# Altium footprint library Connector-KF2EDGK.PcbLib: 91 footprints (part 5 of 6)
Each footprint in its own frame and in the unit in brackets; x right, y up, seen from the top. Pads: shape width x height; smd on the part's side, far side on the other; paste and mask are expansions set on the pad; w line width, h text height; cw(c..) or ccw(c..) is an arc to the next point about the centre after c.
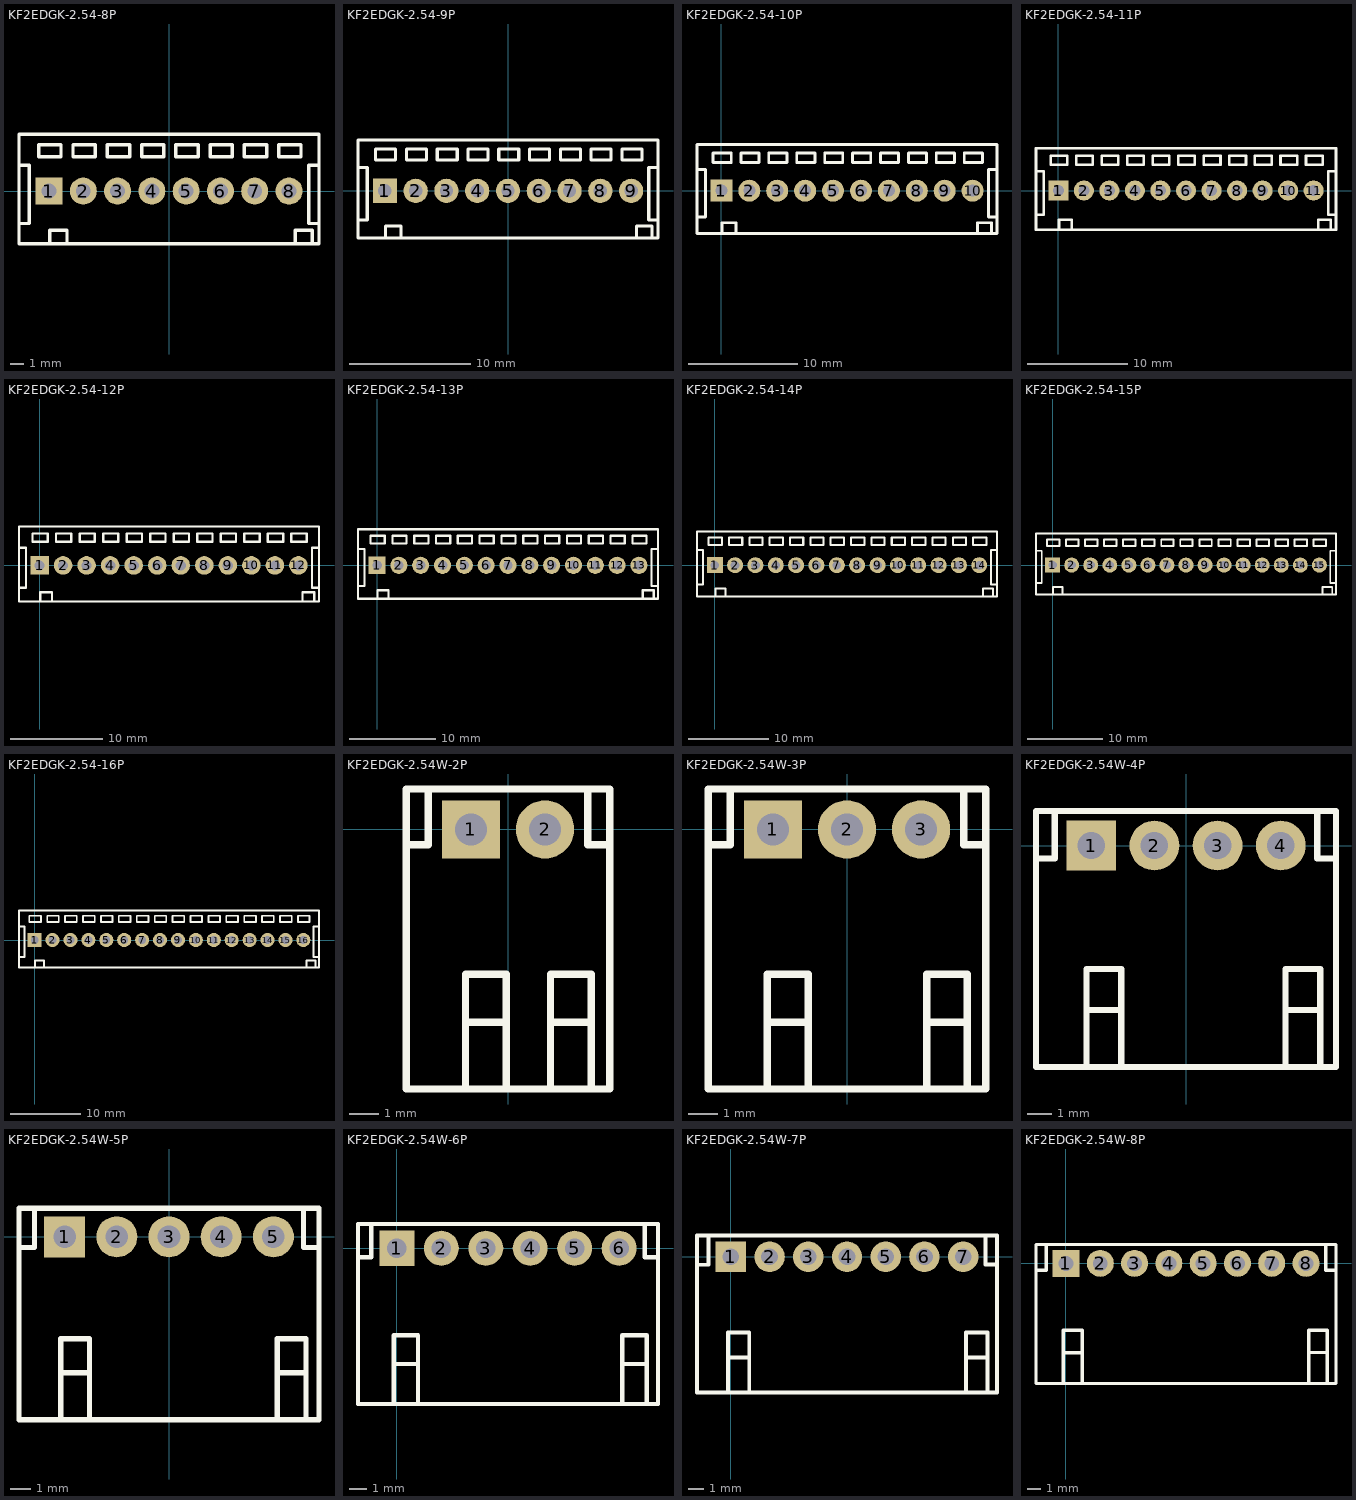
[diagram p4: the footprints below, top view; thin cyan lines are the x and y axes]

## KF2EDGK-2.54-8P [mm]
pads (8):
  rect 2x2 hole 1.1: 1(-8.89,0)
  round 2 hole 1.1: 2(-6.35,0) 3(-3.81,0) 4(-1.27,0) 5(1.27,0) 6(3.81,0) 7(6.35,0) 8(8.89,0)
Top Overlay:
  lines w0.254: -8.824,-3.839 -8.824,-2.912 -7.554,-2.912 -7.554,-3.839 ; 9.337,-3.839 9.337,-2.912 10.607,-2.912 10.607,-3.839 ; 11.11,-2.404 10.348,-2.404 10.348,1.914 11.11,1.914 ; -11.11,-2.404 -11.11,-3.9 11.11,-3.9 11.11,1.914 ; -11.11,-2.404 -10.348,-2.404 -10.348,1.914 -11.11,1.914 ; -11.11,-2.404 -11.11,1.914 ; -11.11,1.914 -11.11,4.2 11.11,4.2 11.11,1.914 ; -9.652,2.549 -9.652,3.438 -8.001,3.438 -8.001,2.549 -9.652,2.549 ; -7.112,2.549 -7.112,3.438 -5.461,3.438 -5.461,2.549 -7.112,2.549 ; -4.572,2.549 -4.572,3.438 -2.921,3.438 -2.921,2.549 -4.572,2.549 ; -2.032,2.549 -2.032,3.438 -0.381,3.438 -0.381,2.549 -2.032,2.549 ; 0.508,2.549 2.159,2.549 2.159,3.438 0.508,3.438 0.508,2.549 ; 3.048,2.549 3.048,3.438 4.699,3.438 4.699,2.549 3.048,2.549 ; 5.588,2.549 5.588,3.438 7.239,3.438 7.239,2.549 5.588,2.549 ; 8.128,2.549 8.128,3.438 9.779,3.438 9.779,2.549 8.128,2.549
3D body "KF2EDGK-2.54-8P.STEP": height 10.15, standoff -3.15, extent -11.12,-3.898 11.1,4.202

## KF2EDGK-2.54-9P [mm]
pads (9):
  rect 2x2 hole 1.1: 1(-10.16,0)
  round 2 hole 1.1: 2(-7.62,0) 3(-5.08,0) 4(-2.54,0) 5(0,0) 6(2.54,0) 7(5.08,0) 8(7.62,0) 9(10.16,0)
Top Overlay:
  lines w0.254: -10.094,-3.839 -10.094,-2.912 -8.824,-2.912 -8.824,-3.839 ; 10.607,-3.839 10.607,-2.912 11.877,-2.912 11.877,-3.839 ; 12.38,-2.404 11.618,-2.404 11.618,1.914 12.38,1.914 ; -12.38,-2.404 -12.38,1.914 ; -12.38,-2.404 -11.618,-2.404 -11.618,1.914 -12.38,1.914 ; -12.38,-2.404 -12.38,-3.9 12.38,-3.9 12.38,1.914 ; -12.38,1.914 -12.38,4.2 12.38,4.2 12.38,1.914 ; -10.922,2.549 -9.271,2.549 -9.271,3.438 -10.922,3.438 -10.922,2.549 ; -8.382,2.549 -6.731,2.549 -6.731,3.438 -8.382,3.438 -8.382,2.549 ; -5.842,2.549 -4.191,2.549 -4.191,3.438 -5.842,3.438 -5.842,2.549 ; -3.302,2.549 -1.651,2.549 -1.651,3.438 -3.302,3.438 -3.302,2.549 ; -0.762,2.549 -0.762,3.438 0.889,3.438 0.889,2.549 -0.762,2.549 ; 1.778,2.549 1.778,3.438 3.429,3.438 3.429,2.549 1.778,2.549 ; 4.318,2.549 4.318,3.438 5.969,3.438 5.969,2.549 4.318,2.549 ; 6.858,2.549 6.858,3.438 8.509,3.438 8.509,2.549 6.858,2.549 ; 9.398,2.549 9.398,3.438 11.049,3.438 11.049,2.549 9.398,2.549
3D body "KF2EDGK-2.54-9P.STEP": height 10.15, standoff -3.15, extent -12.39,-3.898 12.37,4.202

## KF2EDGK-2.54-10P [mm]
pads (10):
  rect 2x2 hole 1.1: 1(0,0)
  round 2 hole 1.1: 2(2.54,0) 3(5.08,0) 4(7.62,0) 5(10.16,0) 6(12.7,0) 7(15.24,0) 8(17.78,0) 9(20.32,0) 10(22.86,0)
Top Overlay:
  lines w0.254: 0.066,-3.839 0.066,-2.912 1.336,-2.912 1.336,-3.839 ; 23.307,-3.839 23.307,-2.912 24.577,-2.912 24.577,-3.839 ; 25.08,-2.404 24.318,-2.404 24.318,1.914 25.08,1.914 ; -2.22,-2.404 -2.22,1.914 ; -2.22,-2.404 -1.458,-2.404 -1.458,1.914 -2.22,1.914 ; -2.22,-2.404 -2.22,-3.9 25.08,-3.9 25.08,1.914 ; -2.22,1.914 -2.22,4.2 25.08,4.2 25.08,1.914 ; -0.762,2.549 0.889,2.549 0.889,3.438 -0.762,3.438 -0.762,2.549 ; 1.778,2.549 3.429,2.549 3.429,3.438 1.778,3.438 1.778,2.549 ; 4.318,2.549 5.969,2.549 5.969,3.438 4.318,3.438 4.318,2.549 ; 6.858,2.549 8.509,2.549 8.509,3.438 6.858,3.438 6.858,2.549 ; 9.398,2.549 9.398,3.438 11.049,3.438 11.049,2.549 9.398,2.549 ; 11.938,2.549 13.589,2.549 13.589,3.438 11.938,3.438 11.938,2.549 ; 14.478,2.549 16.129,2.549 16.129,3.438 14.478,3.438 14.478,2.549 ; 17.018,2.549 18.669,2.549 18.669,3.438 17.018,3.438 17.018,2.549 ; 19.558,2.549 21.209,2.549 21.209,3.438 19.558,3.438 19.558,2.549 ; 22.098,2.549 22.098,3.438 23.749,3.438 23.749,2.549 22.098,2.549
3D body "KF2EDGK-2.54-10P.STEP": height 10.15, standoff -3.15, extent -2.23,-3.923 25.07,4.177

## KF2EDGK-2.54-11P [mm]
pads (11):
  rect 2x2 hole 1.1: 1(0,0)
  round 2 hole 1.1: 2(2.54,0) 3(5.08,0) 4(7.62,0) 5(10.16,0) 6(12.7,0) 7(15.24,0) 8(17.78,0) 9(20.32,0) 10(22.86,0) 11(25.4,0)
Top Overlay:
  lines w0.254: 0.066,-3.839 0.066,-2.912 1.336,-2.912 1.336,-3.839 ; 25.847,-3.839 25.847,-2.912 27.117,-2.912 27.117,-3.839 ; 27.62,-2.404 26.858,-2.404 26.858,1.914 27.62,1.914 ; -2.22,-2.404 -2.22,1.914 ; -2.22,-2.404 -1.458,-2.404 -1.458,1.914 -2.22,1.914 ; -2.22,-2.404 -2.22,-3.9 27.62,-3.9 27.62,1.914 ; -2.22,1.914 -2.22,4.2 27.62,4.2 27.62,1.914 ; -0.762,2.549 -0.762,3.438 0.889,3.438 0.889,2.549 -0.762,2.549 ; 1.778,2.549 1.778,3.438 3.429,3.438 3.429,2.549 1.778,2.549 ; 4.318,2.549 4.318,3.438 5.969,3.438 5.969,2.549 4.318,2.549 ; 6.858,2.549 6.858,3.438 8.509,3.438 8.509,2.549 6.858,2.549 ; 9.398,2.549 11.049,2.549 11.049,3.438 9.398,3.438 9.398,2.549 ; 11.938,2.549 11.938,3.438 13.589,3.438 13.589,2.549 11.938,2.549 ; 14.478,2.549 14.478,3.438 16.129,3.438 16.129,2.549 14.478,2.549 ; 17.018,2.549 17.018,3.438 18.669,3.438 18.669,2.549 17.018,2.549 ; 19.558,2.549 19.558,3.438 21.209,3.438 21.209,2.549 19.558,2.549 ; 22.098,2.549 23.749,2.549 23.749,3.438 22.098,3.438 22.098,2.549 ; 24.638,2.549 26.289,2.549 26.289,3.438 24.638,3.438 24.638,2.549
3D body "KF2EDGK-2.54-11P.STEP": height 10.15, standoff -3.15, extent -2.205,-3.923 27.635,4.177

## KF2EDGK-2.54-12P [mm]
pads (12):
  rect 2x2 hole 1.1: 1(0,0)
  round 2 hole 1.1: 2(2.54,0) 3(5.08,0) 4(7.62,0) 5(10.16,0) 6(12.7,0) 7(15.24,0) 8(17.78,0) 9(20.32,0) 10(22.86,0) 11(25.4,0) 12(27.94,0)
Top Overlay:
  lines w0.254: 0.066,-3.839 0.066,-2.912 1.336,-2.912 1.336,-3.839 ; 28.387,-3.839 28.387,-2.912 29.657,-2.912 29.657,-3.839 ; 30.16,-2.404 29.398,-2.404 29.398,1.914 30.16,1.914 ; -2.22,-2.404 -2.22,1.914 ; -2.22,-2.404 -1.458,-2.404 -1.458,1.914 -2.22,1.914 ; -2.22,-2.404 -2.22,-3.9 30.16,-3.9 30.16,1.914 ; -2.22,1.914 -2.22,4.2 30.16,4.2 30.16,1.914 ; -0.762,2.549 0.889,2.549 0.889,3.438 -0.762,3.438 -0.762,2.549 ; 1.778,2.549 3.429,2.549 3.429,3.438 1.778,3.438 1.778,2.549 ; 4.318,2.549 5.969,2.549 5.969,3.438 4.318,3.438 4.318,2.549 ; 6.858,2.549 8.509,2.549 8.509,3.438 6.858,3.438 6.858,2.549 ; 9.398,2.549 9.398,3.438 11.049,3.438 11.049,2.549 9.398,2.549 ; 11.938,2.549 13.589,2.549 13.589,3.438 11.938,3.438 11.938,2.549 ; 14.478,2.549 16.129,2.549 16.129,3.438 14.478,3.438 14.478,2.549 ; 17.018,2.549 18.669,2.549 18.669,3.438 17.018,3.438 17.018,2.549 ; 19.558,2.549 21.209,2.549 21.209,3.438 19.558,3.438 19.558,2.549 ; 22.098,2.549 22.098,3.438 23.749,3.438 23.749,2.549 22.098,2.549 ; 24.638,2.549 24.638,3.438 26.289,3.438 26.289,2.549 24.638,2.549 ; 27.178,2.549 27.178,3.438 28.829,3.438 28.829,2.549 27.178,2.549
3D body "KF2EDGK-2.54-12P.STEP": height 10.15, standoff -3.15, extent -2.179,-3.912 30.201,4.188

## KF2EDGK-2.54-13P [mm]
pads (13):
  rect 2x2 hole 1.1: 1(0,0)
  round 2 hole 1.1: 2(2.54,0) 3(5.08,0) 4(7.62,0) 5(10.16,0) 6(12.7,0) 7(15.24,0) 8(17.78,0) 9(20.32,0) 10(22.86,0) 11(25.4,0) 12(27.94,0) 13(30.48,0)
Top Overlay:
  lines w0.254: 0.066,-3.839 0.066,-2.912 1.336,-2.912 1.336,-3.839 ; 30.927,-3.839 30.927,-2.912 32.197,-2.912 32.197,-3.839 ; 32.7,-2.404 31.938,-2.404 31.938,1.914 32.7,1.914 ; -2.22,-2.404 -2.22,1.914 ; -2.22,-2.404 -1.458,-2.404 -1.458,1.914 -2.22,1.914 ; -2.22,-2.404 -2.22,-3.9 32.7,-3.9 32.7,1.914 ; -2.22,1.914 -2.22,4.2 32.7,4.2 32.7,1.914 ; -0.762,2.549 0.889,2.549 0.889,3.438 -0.762,3.438 -0.762,2.549 ; 1.778,2.549 3.429,2.549 3.429,3.438 1.778,3.438 1.778,2.549 ; 4.318,2.549 5.969,2.549 5.969,3.438 4.318,3.438 4.318,2.549 ; 6.858,2.549 8.509,2.549 8.509,3.438 6.858,3.438 6.858,2.549 ; 9.398,2.549 9.398,3.438 11.049,3.438 11.049,2.549 9.398,2.549 ; 11.938,2.549 13.589,2.549 13.589,3.438 11.938,3.438 11.938,2.549 ; 14.478,2.549 16.129,2.549 16.129,3.438 14.478,3.438 14.478,2.549 ; 17.018,2.549 18.669,2.549 18.669,3.438 17.018,3.438 17.018,2.549 ; 19.558,2.549 21.209,2.549 21.209,3.438 19.558,3.438 19.558,2.549 ; 22.098,2.549 22.098,3.438 23.749,3.438 23.749,2.549 22.098,2.549 ; 24.638,2.549 24.638,3.438 26.289,3.438 26.289,2.549 24.638,2.549 ; 27.178,2.549 27.178,3.438 28.829,3.438 28.829,2.549 27.178,2.549 ; 29.718,2.549 29.718,3.438 31.369,3.438 31.369,2.549 29.718,2.549
3D body "KF2EDGK-2.54-13P.STEP": height 10.15, standoff -3.15, extent -2.23,-3.898 32.69,4.202

## KF2EDGK-2.54-14P [mm]
pads (14):
  rect 2x2 hole 1.1: 1(0,0)
  round 2 hole 1.1: 2(2.54,0) 3(5.08,0) 4(7.62,0) 5(10.16,0) 6(12.7,0) 7(15.24,0) 8(17.78,0) 9(20.32,0) 10(22.86,0) 11(25.4,0) 12(27.94,0) 13(30.48,0) 14(33.02,0)
Top Overlay:
  lines w0.254: 0.066,-3.839 0.066,-2.912 1.336,-2.912 1.336,-3.839 ; 33.467,-3.839 33.467,-2.912 34.737,-2.912 34.737,-3.839 ; 35.24,-2.404 34.478,-2.404 34.478,1.914 35.24,1.914 ; -2.22,-2.404 -2.22,1.914 ; -2.22,-2.404 -1.458,-2.404 -1.458,1.914 -2.22,1.914 ; -2.22,-2.404 -2.22,-3.9 35.24,-3.9 35.24,1.914 ; -2.22,1.914 -2.22,4.2 35.24,4.2 35.24,1.914 ; -0.762,2.549 0.889,2.549 0.889,3.438 -0.762,3.438 -0.762,2.549 ; 1.778,2.549 3.429,2.549 3.429,3.438 1.778,3.438 1.778,2.549 ; 4.318,2.549 5.969,2.549 5.969,3.438 4.318,3.438 4.318,2.549 ; 6.858,2.549 8.509,2.549 8.509,3.438 6.858,3.438 6.858,2.549 ; 9.398,2.549 9.398,3.438 11.049,3.438 11.049,2.549 9.398,2.549 ; 11.938,2.549 13.589,2.549 13.589,3.438 11.938,3.438 11.938,2.549 ; 14.478,2.549 16.129,2.549 16.129,3.438 14.478,3.438 14.478,2.549 ; 17.018,2.549 18.669,2.549 18.669,3.438 17.018,3.438 17.018,2.549 ; 19.558,2.549 21.209,2.549 21.209,3.438 19.558,3.438 19.558,2.549 ; 22.098,2.549 22.098,3.438 23.749,3.438 23.749,2.549 22.098,2.549 ; 24.638,2.549 24.638,3.438 26.289,3.438 26.289,2.549 24.638,2.549 ; 27.178,2.549 27.178,3.438 28.829,3.438 28.829,2.549 27.178,2.549 ; 29.718,2.549 29.718,3.438 31.369,3.438 31.369,2.549 29.718,2.549 ; 32.258,2.549 32.258,3.438 33.909,3.438 33.909,2.549 32.258,2.549
3D body "KF2EDGK-2.54-14P.STEP": height 10.15, standoff -3.15, extent -2.23,-3.948 35.23,4.152

## KF2EDGK-2.54-15P [mm]
pads (15):
  rect 2x2 hole 1.1: 1(0,0)
  round 2 hole 1.1: 2(2.54,0) 3(5.08,0) 4(7.62,0) 5(10.16,0) 6(12.7,0) 7(15.24,0) 8(17.78,0) 9(20.32,0) 10(22.86,0) 11(25.4,0) 12(27.94,0) 13(30.48,0) 14(33.02,0) 15(35.56,0)
Top Overlay:
  lines w0.254: 0.066,-3.839 0.066,-2.912 1.336,-2.912 1.336,-3.839 ; 36.007,-3.839 36.007,-2.912 37.277,-2.912 37.277,-3.839 ; 37.78,-2.404 37.018,-2.404 37.018,1.914 37.78,1.914 ; -2.22,-2.404 -2.22,-3.9 37.78,-3.9 37.78,1.914 ; -2.22,-2.404 -1.458,-2.404 -1.458,1.914 -2.22,1.914 ; -2.22,-2.404 -2.22,1.914 ; -2.22,1.914 -2.22,4.2 37.78,4.2 37.78,1.914 ; -0.762,2.549 0.889,2.549 0.889,3.438 -0.762,3.438 -0.762,2.549 ; 1.778,2.549 3.429,2.549 3.429,3.438 1.778,3.438 1.778,2.549 ; 4.318,2.549 5.969,2.549 5.969,3.438 4.318,3.438 4.318,2.549 ; 6.858,2.549 8.509,2.549 8.509,3.438 6.858,3.438 6.858,2.549 ; 9.398,2.549 9.398,3.438 11.049,3.438 11.049,2.549 9.398,2.549 ; 11.938,2.549 13.589,2.549 13.589,3.438 11.938,3.438 11.938,2.549 ; 14.478,2.549 16.129,2.549 16.129,3.438 14.478,3.438 14.478,2.549 ; 17.018,2.549 18.669,2.549 18.669,3.438 17.018,3.438 17.018,2.549 ; 19.558,2.549 21.209,2.549 21.209,3.438 19.558,3.438 19.558,2.549 ; 22.098,2.549 22.098,3.438 23.749,3.438 23.749,2.549 22.098,2.549 ; 24.638,2.549 26.289,2.549 26.289,3.438 24.638,3.438 24.638,2.549 ; 27.178,2.549 28.829,2.549 28.829,3.438 27.178,3.438 27.178,2.549 ; 29.718,2.549 31.369,2.549 31.369,3.438 29.718,3.438 29.718,2.549 ; 32.258,2.549 33.909,2.549 33.909,3.438 32.258,3.438 32.258,2.549 ; 34.798,2.549 34.798,3.438 36.449,3.438 36.449,2.549 34.798,2.549
3D body "KF2EDGK-2.54-15P.STEP": height 10.15, standoff -3.15, extent -2.184,-3.923 37.816,4.177

## KF2EDGK-2.54-16P [mm]
pads (16):
  rect 2x2 hole 1.1: 1(0,0)
  round 2 hole 1.1: 2(2.54,0) 3(5.08,0) 4(7.62,0) 5(10.16,0) 6(12.7,0) 7(15.24,0) 8(17.78,0) 9(20.32,0) 10(22.86,0) 11(25.4,0) 12(27.94,0) 13(30.48,0) 14(33.02,0) 15(35.56,0) 16(38.1,0)
Top Overlay:
  lines w0.254: 0.066,-3.839 0.066,-2.912 1.336,-2.912 1.336,-3.839 ; 38.547,-3.839 38.547,-2.912 39.817,-2.912 39.817,-3.839 ; 40.32,-2.404 39.558,-2.404 39.558,1.914 40.32,1.914 ; -2.22,-2.404 -2.22,-3.9 40.32,-3.9 40.32,1.914 ; -2.22,-2.404 -1.458,-2.404 -1.458,1.914 -2.22,1.914 ; -2.22,-2.404 -2.22,1.914 ; -2.22,1.914 -2.22,4.2 40.32,4.2 40.32,1.914 ; -0.762,2.549 0.889,2.549 0.889,3.438 -0.762,3.438 -0.762,2.549 ; 1.778,2.549 3.429,2.549 3.429,3.438 1.778,3.438 1.778,2.549 ; 4.318,2.549 5.969,2.549 5.969,3.438 4.318,3.438 4.318,2.549 ; 6.858,2.549 8.509,2.549 8.509,3.438 6.858,3.438 6.858,2.549 ; 9.398,2.549 9.398,3.438 11.049,3.438 11.049,2.549 9.398,2.549 ; 11.938,2.549 13.589,2.549 13.589,3.438 11.938,3.438 11.938,2.549 ; 14.478,2.549 16.129,2.549 16.129,3.438 14.478,3.438 14.478,2.549 ; 17.018,2.549 18.669,2.549 18.669,3.438 17.018,3.438 17.018,2.549 ; 19.558,2.549 21.209,2.549 21.209,3.438 19.558,3.438 19.558,2.549 ; 22.098,2.549 22.098,3.438 23.749,3.438 23.749,2.549 22.098,2.549 ; 24.638,2.549 26.289,2.549 26.289,3.438 24.638,3.438 24.638,2.549 ; 27.178,2.549 28.829,2.549 28.829,3.438 27.178,3.438 27.178,2.549 ; 29.718,2.549 31.369,2.549 31.369,3.438 29.718,3.438 29.718,2.549 ; 32.258,2.549 33.909,2.549 33.909,3.438 32.258,3.438 32.258,2.549 ; 34.798,2.549 34.798,3.438 36.449,3.438 36.449,2.549 34.798,2.549 ; 37.338,2.549 38.989,2.549 38.989,3.438 37.338,3.438 37.338,2.549
3D body "KF2EDGK-2.54-16P.STEP": height 10.15, standoff -3.15, extent -2.184,-3.923 40.356,4.177

## KF2EDGK-2.54W-2P [mm]
pads (2):
  rect 2x2 hole 1.1: 1(-1.27,0)
  round 2 hole 1.1: 2(1.27,0)
Top Overlay:
  lines w0.254: -3.49,-0.518 -2.733,-0.518 -2.733,1.387 ; -1.458,-8.9 -1.458,-4.963 -0.061,-4.963 -0.061,-8.9 ; -1.458,-6.614 -0.061,-6.614 ; 1.458,-8.9 1.458,-4.963 2.855,-4.963 2.855,-8.9 ; 1.458,-6.614 2.855,-6.614 ; 2.733,1.387 2.733,-0.518 3.49,-0.518 ; -3.49,-8.9 3.49,-8.9 3.49,1.387 -3.49,1.387 -3.49,-8.9
Top Value:
  text "'.Comment'" at -6.578,-3.173 h3
Top Designator:
  text "'.Designator'" at -8.563,-2.929 h3
3D body "KF2EDGK-2.54W-2P.STEP": height 8.15, standoff -3.25, extent -3.505,-8.911 3.475,1.189

## KF2EDGK-2.54W-3P [mm]
pads (3):
  rect 2x2 hole 1.1: 1(-2.54,0)
  round 2 hole 1.1: 2(0,0) 3(2.54,0)
Top Overlay:
  lines w0.254: -4.76,-0.518 -4.003,-0.518 -4.003,1.387 ; -2.728,-8.9 -2.728,-4.963 -1.331,-4.963 -1.331,-8.9 ; -2.728,-6.614 -1.331,-6.614 ; 2.728,-8.9 2.728,-4.963 4.125,-4.963 4.125,-8.9 ; 2.728,-6.614 4.125,-6.614 ; 4.003,1.387 4.003,-0.518 4.76,-0.518 ; -4.76,-8.9 -4.76,1.387 4.76,1.387 4.76,-8.9 -4.76,-8.9
Top Value:
  text "'.Comment'" at -6.563,-3.273 h3
Top Designator:
  text "'.Designator'" at -8.548,-3.029 h3
3D body "KF2EDGK-2.54W-3P.STEP": height 8.15, standoff -3.25, extent -4.735,-8.906 4.785,1.194

## KF2EDGK-2.54W-4P [mm]
pads (4):
  rect 2x2 hole 1.1: 1(-3.81,0)
  round 2 hole 1.1: 2(-1.27,0) 3(1.27,0) 4(3.81,0)
Top Overlay:
  lines w0.254: -6.03,-0.518 -5.273,-0.518 -5.273,1.387 ; -3.998,-8.9 -3.998,-4.963 -2.601,-4.963 -2.601,-8.9 ; -3.998,-6.614 -2.601,-6.614 ; 3.998,-8.9 3.998,-4.963 5.395,-4.963 5.395,-8.9 ; 3.998,-6.614 5.395,-6.614 ; 5.273,1.387 5.273,-0.518 6.03,-0.518 ; -6.03,-8.9 -6.03,1.387 6.03,1.387 6.03,-8.9 -6.03,-8.9
Top Value:
  text "'.Comment'" at -6.552,-3.273 h3
Top Designator:
  text "'.Designator'" at -8.537,-3.029 h3
3D body "KF2EDGK-2.54W-4P.STEP": height 8.15, standoff -3.25, extent -6.02,-8.881 6.04,1.219

## KF2EDGK-2.54W-5P [mm]
pads (5):
  rect 2x2 hole 1.1: 1(-5.08,0)
  round 2 hole 1.1: 2(-2.54,0) 3(0,0) 4(2.54,0) 5(5.08,0)
Top Overlay:
  lines w0.254: -7.3,-0.518 -6.543,-0.518 -6.543,1.387 ; -5.268,-8.9 -5.268,-4.963 -3.871,-4.963 -3.871,-8.9 ; -5.268,-6.614 -3.871,-6.614 ; 5.268,-8.9 5.268,-4.963 6.665,-4.963 6.665,-8.9 ; 5.268,-6.614 6.665,-6.614 ; 6.543,1.387 6.543,-0.518 7.3,-0.518 ; -7.3,-8.9 -7.3,1.387 7.3,1.387 7.3,-8.9 -7.3,-8.9
3D body "KF2EDGK-2.54W-5P.STEP": height 8.15, standoff -3.25, extent -7.29,-8.885 7.31,1.215

## KF2EDGK-2.54W-6P [mm]
pads (6):
  rect 2x2 hole 1.1: 1(0,0)
  round 2 hole 1.1: 2(2.54,0) 3(5.08,0) 4(7.62,0) 5(10.16,0) 6(12.7,0)
Top Overlay:
  lines w0.254: -2.22,-0.518 -1.463,-0.518 -1.463,1.387 ; -0.188,-8.9 -0.188,-4.963 1.209,-4.963 1.209,-8.9 ; -0.188,-6.614 1.209,-6.614 ; 12.888,-8.9 12.888,-4.963 14.285,-4.963 14.285,-8.9 ; 12.888,-6.614 14.285,-6.614 ; 14.163,1.387 14.163,-0.518 14.92,-0.518 ; -2.22,-8.9 14.92,-8.9 14.92,1.387 -2.22,1.387 -2.22,-8.9
3D body "KF2EDGK-2.54W-6P.STEP": height 8.15, standoff -3.25, extent -2.21,-8.885 14.93,1.215

## KF2EDGK-2.54W-7P [mm]
pads (7):
  rect 2x2 hole 1.1: 1(0,0)
  round 2 hole 1.1: 2(2.54,0) 3(5.08,0) 4(7.62,0) 5(10.16,0) 6(12.7,0) 7(15.24,0)
Top Overlay:
  lines w0.254: -2.22,-0.518 -1.463,-0.518 -1.463,1.387 ; -2.22,1.387 -2.22,-8.9 17.46,-8.9 ; -2.22,1.397 17.46,1.397 17.46,-8.89 ; -0.188,-8.9 -0.188,-4.963 1.209,-4.963 1.209,-8.9 ; -0.188,-6.614 1.209,-6.614 ; 15.428,-8.89 15.428,-4.953 16.825,-4.953 16.825,-8.89 ; 15.428,-6.604 16.825,-6.604 ; 16.703,1.397 16.703,-0.508 17.46,-0.508
3D body "KF2EDGK-2.54W-7P.STEP": height 8.15, standoff -3.25, extent -2.184,-8.906 17.496,1.194

## KF2EDGK-2.54W-8P [mm]
pads (8):
  rect 2x2 hole 1.1: 1(0,0)
  round 2 hole 1.1: 2(2.54,0) 3(5.08,0) 4(7.62,0) 5(10.16,0) 6(12.7,0) 7(15.24,0) 8(17.78,0)
Top Overlay:
  lines w0.254: -2.22,-0.518 -1.463,-0.518 -1.463,1.387 ; -2.22,1.387 -2.22,-8.9 20,-8.9 ; -2.22,1.397 20,1.397 20,-8.89 ; -0.188,-8.9 -0.188,-4.963 1.209,-4.963 1.209,-8.9 ; -0.188,-6.614 1.209,-6.614 ; 17.968,-8.89 17.968,-4.953 19.365,-4.953 19.365,-8.89 ; 17.968,-6.604 19.365,-6.604 ; 19.243,1.397 19.243,-0.508 20,-0.508
3D body "KF2EDGK-2.54W-8P.STEP": height 8.15, standoff -3.25, extent -2.154,-8.86 20.066,1.24